# EAGLE library part ESP32-S3-WROOM-1-N16R2 (library ESP32-S3-WROOM-1-N16R2)
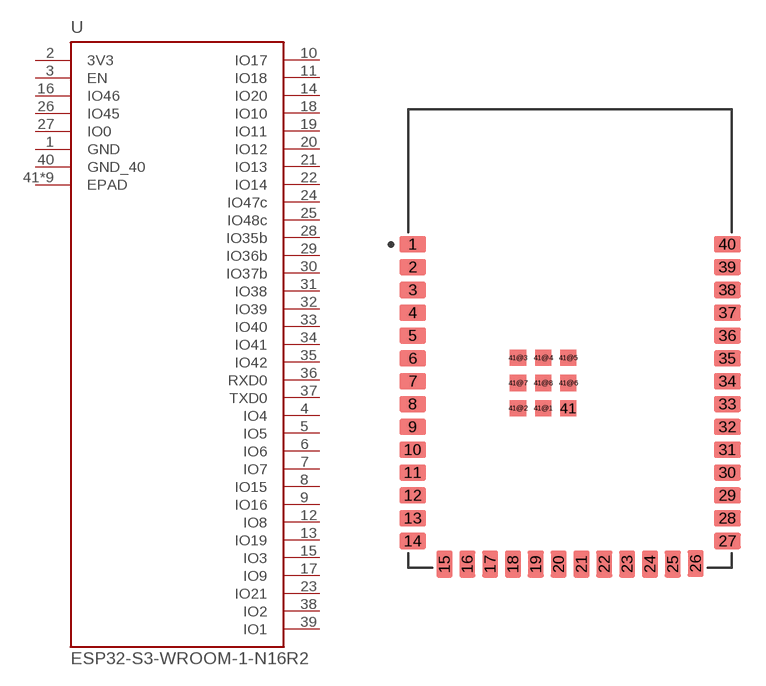
[diagram p0: symbol with the pads of C2913205_SMD_25.5x18mm; footprint C2913205_SMD_25.5x18mm]

Designator prefix U

## ESP32-S3-WROOM-1-N16R2  [C2913205_SMD_25.5x18mm]
1  GND  pwr
2  3V3  pwr
3  EN  in
4  IO4
5  IO5
6  IO6
7  IO7
8  IO15
9  IO16
10  IO17
11  IO18
12  IO8
13  IO19
14  IO20
15  IO3
16  IO46
17  IO9
18  IO10
19  IO11
20  IO12
21  IO13
22  IO14
23  IO21
24  IO47c
25  IO48c
26  IO45
27  IO0
28  IO35b
29  IO36b
30  IO37b
31  IO38  in
32  IO39  in
33  IO40
34  IO41
35  IO42
36  RXD0
37  TXD0
38  IO2
39  IO1
40  GND_40  pwr
41  EPAD  pwr
41@1  EPAD  pwr
41@2  EPAD  pwr
41@3  EPAD  pwr
41@4  EPAD  pwr
41@5  EPAD  pwr
41@6  EPAD  pwr
41@7  EPAD  pwr
41@8  EPAD  pwr

## Footprint C2913205_SMD_25.5x18mm (pad centres in mm)
ESP32-S3-WROOM-1-N16R2 — Clean-Room Clean-Room Metric Synthesis (CASTELLATED_MODULE)
smd 1.5 x 0.9: 1 -8.75,5.25; 2 -8.75,3.98; 3 -8.75,2.71; 4 -8.75,1.44; 5 -8.75,0.17; 6 -8.75,-1.1; 7 -8.75,-2.37; 8 -8.75,-3.64; 9 -8.75,-4.91; 10 -8.75,-6.18; 11 -8.75,-7.45; 12 -8.75,-8.72; 13 -8.75,-9.99; 14 -8.75,-11.26; 27 8.75,-11.26; 28 8.75,-9.99; 29 8.75,-8.72; 30 8.75,-7.45; 31 8.75,-6.18; 32 8.75,-4.91; 33 8.75,-3.64; 34 8.75,-2.37; 35 8.75,-1.1; 36 8.75,0.17; 37 8.75,1.44; 38 8.75,2.71; 39 8.75,3.98; 40 8.75,5.25
smd 0.9 x 1.5: 15 -6.985,-12.54; 16 -5.715,-12.54; 17 -4.445,-12.54; 18 -3.175,-12.54; 19 -1.905,-12.54; 20 -0.635,-12.54; 21 0.635,-12.54; 22 1.905,-12.54; 23 3.175,-12.54; 24 4.445,-12.54; 25 5.715,-12.54; 26 6.985,-12.51
smd 0.9 x 0.9: 41 -0.1,-3.87; 41@1 -1.5,-3.87; 41@2 -2.9,-3.87; 41@3 -2.9,-1.07; 41@4 -1.5,-1.07; 41@5 -0.1,-1.07; 41@6 -0.1,-2.47; 41@7 -2.9,-2.47; 41@8 -1.5,-2.47